# Altium footprint library Package_DFN_QFN.PcbLib: 735 footprints (part 41 of 46)
Each footprint in its own frame and in the unit in brackets; x right, y up, seen from the top. Pads: shape width x height; smd on the part's side, far side on the other; paste and mask are expansions set on the pad; w line width, h text height; cw(c..) or ccw(c..) is an arc to the next point about the centre after c.
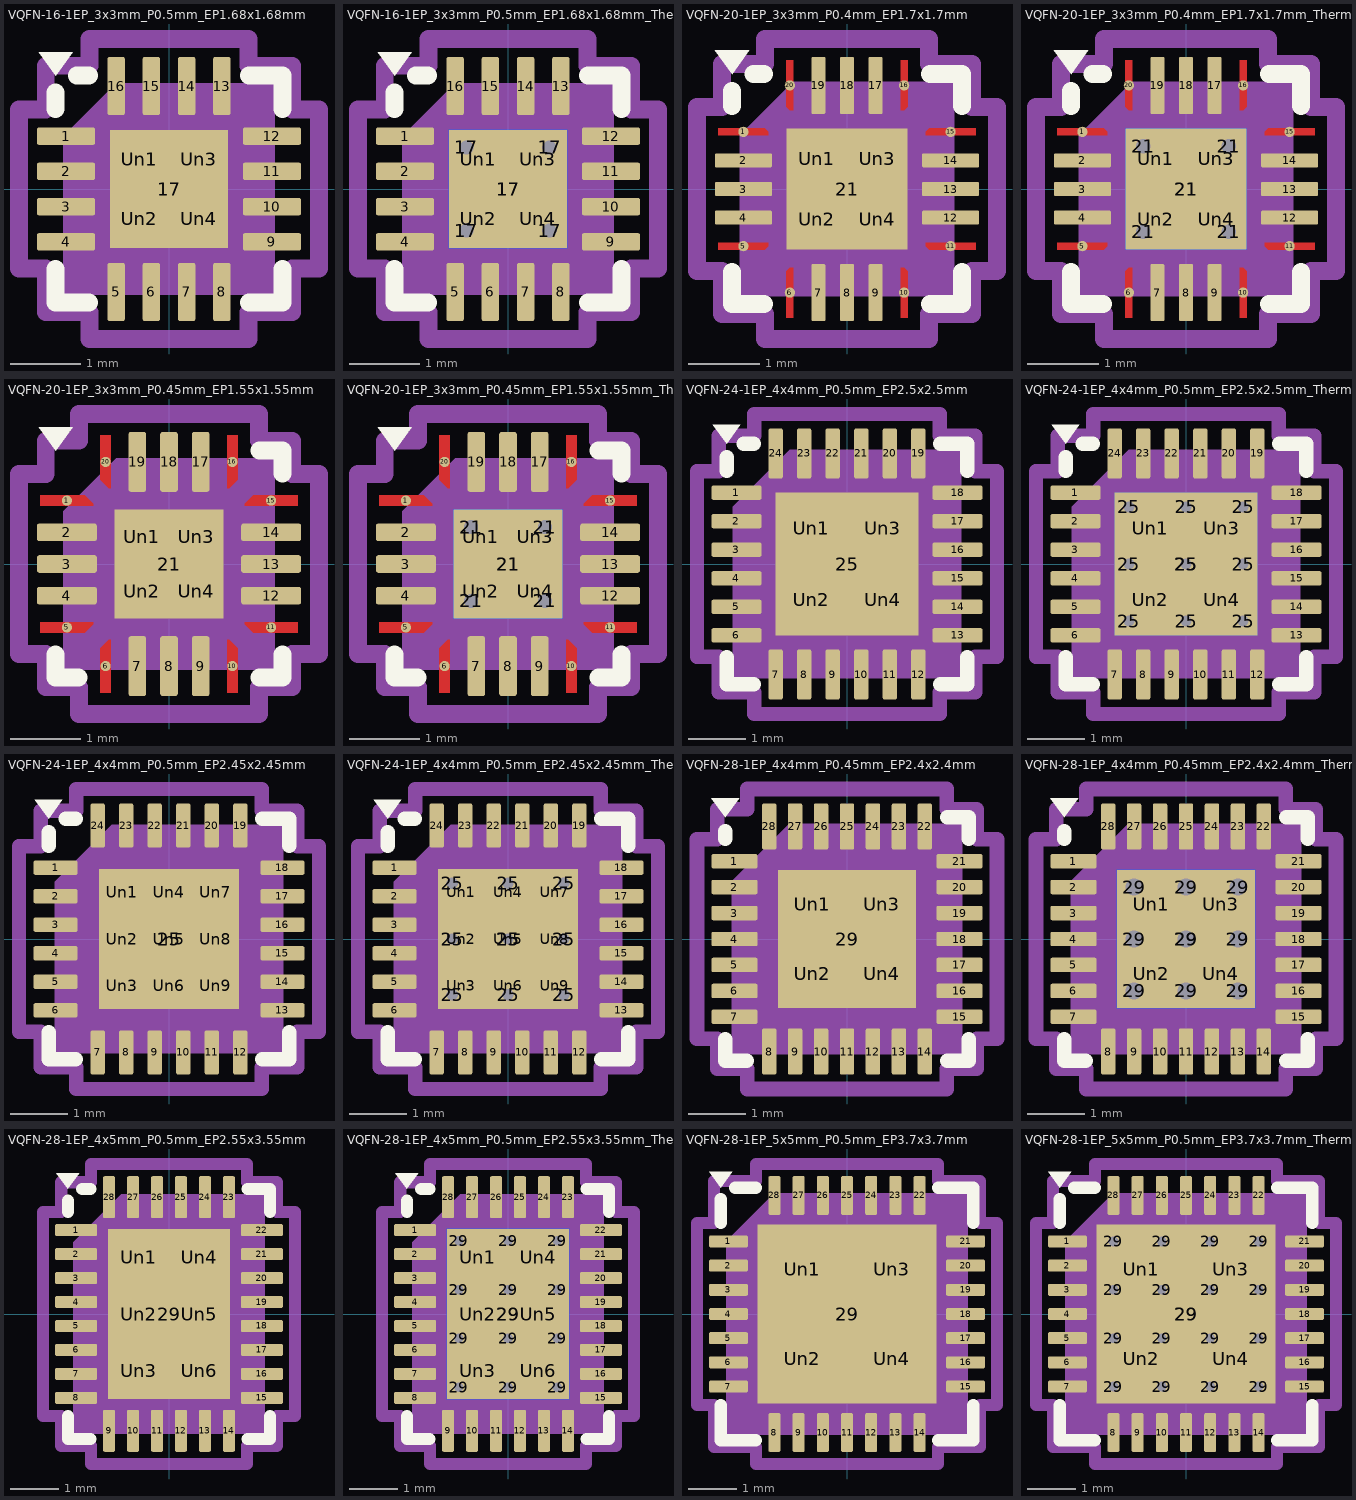
[diagram p40: the footprints below, top view; thin cyan lines are the x and y axes]

## VQFN-16-1EP_3x3mm_P0.5mm_EP1.68x1.68mm [mm] "VQFN-16-1EP_3x3mm_P0.5mm_EP1.68x1.68mm"
pads (21):
  rrect25% 0.825x0.25 smd: 1(-1.462,0.75) 2(-1.462,0.25) 3(-1.462,-0.25) 4(-1.462,-0.75) 9(1.462,-0.75) 10(1.462,-0.25) 11(1.462,0.25) 12(1.462,0.75)
  rrect25% 0.25x0.825 smd: 5(-0.75,-1.462) 6(-0.25,-1.462) 7(0.25,-1.462) 8(0.75,-1.462) 13(0.75,1.462) 14(0.25,1.462) 15(-0.25,1.462) 16(-0.75,1.462)
  rect 1.68x1.68 smd: 17(0,0)
  rrect25% 0.68x0.68 on Top Paste: Un1(-0.42,0.42) Un2(-0.42,-0.42) Un3(0.42,0.42) Un4(0.42,-0.42)
F.SilkS:
  region: -1.61,1.61 -1.85,1.94 -1.37,1.94
  lines w0.254: -1.61,-1.135 -1.61,-1.61 -1.135,-1.61 ; -1.61,1.135 -1.61,1.37 ; -1.31,1.61 -1.135,1.61 ; 1.135,-1.61 1.61,-1.61 1.61,-1.135 ; 1.135,1.61 1.61,1.61 1.61,1.135
Top Component Center:
  lines w0.127: -0.127,0 0.127,0 -0.127,0 ; 0,-0.127 0,0.127 0,-0.127
Top Assembly:
  region: 1.5,-1.5 -1.5,-1.5 -1.5,0.75 -0.75,1.5 1.5,1.5
Top Courtyard:
  lines w0.254: -2.13,-1.13 -1.75,-1.13 -1.75,-1.75 -1.13,-1.75 -1.13,-2.13 1.13,-2.13 1.13,-1.75 1.75,-1.75 1.75,-1.13 2.13,-1.13 2.13,1.13 1.75,1.13 1.75,1.75 1.13,1.75 1.13,2.13 -1.13,2.13 -1.13,1.75 -1.75,1.75 -1.75,1.13 -2.13,1.13 -2.13,-1.13
Top Designator:
  text ".Designator" at -3.43,-0.344 h1.52

## VQFN-16-1EP_3x3mm_P0.5mm_EP1.68x1.68mm_ThermalVias [mm] "VQFN-16-1EP_3x3mm_P0.5mm_EP1.68x1.68mm_ThermalVias"
pads (26):
  rrect25% 0.825x0.25 smd: 1(-1.462,0.75) 2(-1.462,0.25) 3(-1.462,-0.25) 4(-1.462,-0.75) 9(1.462,-0.75) 10(1.462,-0.25) 11(1.462,0.25) 12(1.462,0.75)
  rrect25% 0.25x0.825 smd: 5(-0.75,-1.462) 6(-0.25,-1.462) 7(0.25,-1.462) 8(0.75,-1.462) 13(0.75,1.462) 14(0.25,1.462) 15(-0.25,1.462) 16(-0.75,1.462)
  round 0.5 hole 0.2: 17(-0.59,-0.59) 17(-0.59,0.59) 17(0.59,-0.59) 17(0.59,0.59)
  rect 1.68x1.68 smd: 17(0,0)
  rect 1.68x1.68 smd far side: 17(0,0)
  rrect25% 0.73x0.73 on Top Paste: Un1(-0.42,0.42) Un2(-0.42,-0.42) Un3(0.42,0.42) Un4(0.42,-0.42)
F.SilkS:
  region: -1.61,1.61 -1.85,1.94 -1.37,1.94
  lines w0.254: -1.61,-1.135 -1.61,-1.61 -1.135,-1.61 ; -1.61,1.135 -1.61,1.37 ; -1.31,1.61 -1.135,1.61 ; 1.135,-1.61 1.61,-1.61 1.61,-1.135 ; 1.135,1.61 1.61,1.61 1.61,1.135
Top Component Center:
  lines w0.127: -0.127,0 0.127,0 -0.127,0 ; 0,-0.127 0,0.127 0,-0.127
Top Assembly:
  region: 1.5,-1.5 -1.5,-1.5 -1.5,0.75 -0.75,1.5 1.5,1.5
Top Courtyard:
  lines w0.254: -2.13,-1.13 -1.75,-1.13 -1.75,-1.75 -1.13,-1.75 -1.13,-2.13 1.13,-2.13 1.13,-1.75 1.75,-1.75 1.75,-1.13 2.13,-1.13 2.13,1.13 1.75,1.13 1.75,1.75 1.13,1.75 1.13,2.13 -1.13,2.13 -1.13,1.75 -1.75,1.75 -1.75,1.13 -2.13,1.13 -2.13,-1.13
Top Designator:
  text ".Designator" at -3.43,-0.344 h1.52

## VQFN-20-1EP_3x3mm_P0.4mm_EP1.7x1.7mm [mm] "VQFN-20-1EP_3x3mm_P0.4mm_EP1.7x1.7mm"
pads (25):
  round 0.143 smd: 1(-1.45,0.8) 5(-1.45,-0.8) 6(-0.8,-1.45) 10(0.8,-1.45) 11(1.45,-0.8) 15(1.45,0.8) 16(0.8,1.45) 20(-0.8,1.45)
  rrect25% 0.8x0.2 smd: 2(-1.45,0.4) 3(-1.45,0) 4(-1.45,-0.4) 12(1.45,-0.4) 13(1.45,0) 14(1.45,0.4)
  rrect25% 0.2x0.8 smd: 7(-0.4,-1.45) 8(0,-1.45) 9(0.4,-1.45) 17(0.4,1.45) 18(0,1.45) 19(-0.4,1.45)
  rect 1.7x1.7 smd: 21(0,0)
  rrect25% 0.69x0.69 on Top Paste: Un1(-0.425,0.425) Un2(-0.425,-0.425) Un3(0.425,0.425) Un4(0.425,-0.425)
F.Cu:
  region: -1.1,0.799 -1.1,0.75 -1.8,0.75 -1.8,0.85 -1.151,0.85
  region: -1.1,-0.799 -1.151,-0.85 -1.8,-0.85 -1.8,-0.75 -1.1,-0.75
  region: -0.75,-1.8 -0.85,-1.8 -0.85,-1.151 -0.799,-1.1 -0.75,-1.1
  region: 0.85,-1.151 0.85,-1.8 0.75,-1.8 0.75,-1.1 0.799,-1.1
  region: 1.8,-0.85 1.151,-0.85 1.1,-0.799 1.1,-0.75 1.8,-0.75
  region: 1.8,0.75 1.1,0.75 1.1,0.799 1.151,0.85 1.8,0.85
  region: 0.85,1.151 0.799,1.1 0.75,1.1 0.75,1.8 0.85,1.8
  region: -0.75,1.1 -0.799,1.1 -0.85,1.151 -0.85,1.8 -0.75,1.8
F.SilkS:
  region: -1.61,1.61 -1.85,1.94 -1.37,1.94
  lines w0.254: -1.61,-1.16 -1.61,-1.61 -1.16,-1.61 ; -1.61,1.16 -1.61,1.37 ; -1.31,1.61 -1.16,1.61 ; 1.16,-1.61 1.61,-1.61 1.61,-1.16 ; 1.16,1.61 1.61,1.61 1.61,1.16
F.Paste:
  region: -1.1,0.799 -1.1,0.75 -1.8,0.75 -1.8,0.85 -1.151,0.85
  region: -1.1,-0.799 -1.151,-0.85 -1.8,-0.85 -1.8,-0.75 -1.1,-0.75
  region: -0.75,-1.8 -0.85,-1.8 -0.85,-1.151 -0.799,-1.1 -0.75,-1.1
  region: 0.85,-1.151 0.85,-1.8 0.75,-1.8 0.75,-1.1 0.799,-1.1
  region: 1.8,-0.85 1.151,-0.85 1.1,-0.799 1.1,-0.75 1.8,-0.75
  region: 1.8,0.75 1.1,0.75 1.1,0.799 1.151,0.85 1.8,0.85
  region: 0.85,1.151 0.799,1.1 0.75,1.1 0.75,1.8 0.85,1.8
  region: -0.75,1.1 -0.799,1.1 -0.85,1.151 -0.85,1.8 -0.75,1.8
F.Mask:
  region: -1.1,0.799 -1.1,0.75 -1.8,0.75 -1.8,0.85 -1.151,0.85
  region: -1.1,-0.799 -1.151,-0.85 -1.8,-0.85 -1.8,-0.75 -1.1,-0.75
  region: -0.75,-1.8 -0.85,-1.8 -0.85,-1.151 -0.799,-1.1 -0.75,-1.1
  region: 0.85,-1.151 0.85,-1.8 0.75,-1.8 0.75,-1.1 0.799,-1.1
  region: 1.8,-0.85 1.151,-0.85 1.1,-0.799 1.1,-0.75 1.8,-0.75
  region: 1.8,0.75 1.1,0.75 1.1,0.799 1.151,0.85 1.8,0.85
  region: 0.85,1.151 0.799,1.1 0.75,1.1 0.75,1.8 0.85,1.8
  region: -0.75,1.1 -0.799,1.1 -0.85,1.151 -0.85,1.8 -0.75,1.8
Top Component Center:
  lines w0.127: -0.127,0 0.127,0 -0.127,0 ; 0,-0.127 0,0.127 0,-0.127
Top Assembly:
  region: 1.5,-1.5 -1.5,-1.5 -1.5,0.75 -0.75,1.5 1.5,1.5
Top Courtyard:
  lines w0.254: -2.1,-1.15 -2.1,1.15 -1.75,1.15 -1.75,1.75 -1.15,1.75 -1.15,2.1 1.15,2.1 1.15,1.75 1.75,1.75 1.75,1.15 2.1,1.15 2.1,-1.15 1.75,-1.15 1.75,-1.75 1.15,-1.75 1.15,-2.1 -1.15,-2.1 -1.15,-1.75 -1.75,-1.75 -1.75,-1.15 -2.1,-1.15
Top Designator:
  text ".Designator" at -3.43,-0.344 h1.52

## VQFN-20-1EP_3x3mm_P0.4mm_EP1.7x1.7mm_ThermalVias [mm] "VQFN-20-1EP_3x3mm_P0.4mm_EP1.7x1.7mm_ThermalVias"
pads (30):
  round 0.143 smd: 1(-1.45,0.8) 5(-1.45,-0.8) 6(-0.8,-1.45) 10(0.8,-1.45) 11(1.45,-0.8) 15(1.45,0.8) 16(0.8,1.45) 20(-0.8,1.45)
  rrect25% 0.8x0.2 smd: 2(-1.45,0.4) 3(-1.45,0) 4(-1.45,-0.4) 12(1.45,-0.4) 13(1.45,0) 14(1.45,0.4)
  rrect25% 0.2x0.8 smd: 7(-0.4,-1.45) 8(0,-1.45) 9(0.4,-1.45) 17(0.4,1.45) 18(0,1.45) 19(-0.4,1.45)
  round 0.5 hole 0.2: 21(-0.6,-0.6) 21(-0.6,0.6) 21(0.6,-0.6) 21(0.6,0.6)
  rect 1.7x1.7 smd: 21(0,0)
  rect 1.7x1.7 smd far side: 21(0,0)
  rrect25% 0.74x0.74 on Top Paste: Un1(-0.425,0.425) Un2(-0.425,-0.425) Un3(0.425,0.425) Un4(0.425,-0.425)
F.Cu:
  region: -1.1,0.799 -1.1,0.75 -1.8,0.75 -1.8,0.85 -1.151,0.85
  region: -1.1,-0.799 -1.151,-0.85 -1.8,-0.85 -1.8,-0.75 -1.1,-0.75
  region: -0.75,-1.8 -0.85,-1.8 -0.85,-1.151 -0.799,-1.1 -0.75,-1.1
  region: 0.85,-1.151 0.85,-1.8 0.75,-1.8 0.75,-1.1 0.799,-1.1
  region: 1.8,-0.85 1.151,-0.85 1.1,-0.799 1.1,-0.75 1.8,-0.75
  region: 1.8,0.75 1.1,0.75 1.1,0.799 1.151,0.85 1.8,0.85
  region: 0.85,1.151 0.799,1.1 0.75,1.1 0.75,1.8 0.85,1.8
  region: -0.75,1.1 -0.799,1.1 -0.85,1.151 -0.85,1.8 -0.75,1.8
F.SilkS:
  region: -1.61,1.61 -1.85,1.94 -1.37,1.94
  lines w0.254: -1.61,-1.16 -1.61,-1.61 -1.16,-1.61 ; -1.61,1.16 -1.61,1.37 ; -1.31,1.61 -1.16,1.61 ; 1.16,-1.61 1.61,-1.61 1.61,-1.16 ; 1.16,1.61 1.61,1.61 1.61,1.16
F.Paste:
  region: -1.1,0.799 -1.1,0.75 -1.8,0.75 -1.8,0.85 -1.151,0.85
  region: -1.1,-0.799 -1.151,-0.85 -1.8,-0.85 -1.8,-0.75 -1.1,-0.75
  region: -0.75,-1.8 -0.85,-1.8 -0.85,-1.151 -0.799,-1.1 -0.75,-1.1
  region: 0.85,-1.151 0.85,-1.8 0.75,-1.8 0.75,-1.1 0.799,-1.1
  region: 1.8,-0.85 1.151,-0.85 1.1,-0.799 1.1,-0.75 1.8,-0.75
  region: 1.8,0.75 1.1,0.75 1.1,0.799 1.151,0.85 1.8,0.85
  region: 0.85,1.151 0.799,1.1 0.75,1.1 0.75,1.8 0.85,1.8
  region: -0.75,1.1 -0.799,1.1 -0.85,1.151 -0.85,1.8 -0.75,1.8
F.Mask:
  region: -1.1,0.799 -1.1,0.75 -1.8,0.75 -1.8,0.85 -1.151,0.85
  region: -1.1,-0.799 -1.151,-0.85 -1.8,-0.85 -1.8,-0.75 -1.1,-0.75
  region: -0.75,-1.8 -0.85,-1.8 -0.85,-1.151 -0.799,-1.1 -0.75,-1.1
  region: 0.85,-1.151 0.85,-1.8 0.75,-1.8 0.75,-1.1 0.799,-1.1
  region: 1.8,-0.85 1.151,-0.85 1.1,-0.799 1.1,-0.75 1.8,-0.75
  region: 1.8,0.75 1.1,0.75 1.1,0.799 1.151,0.85 1.8,0.85
  region: 0.85,1.151 0.799,1.1 0.75,1.1 0.75,1.8 0.85,1.8
  region: -0.75,1.1 -0.799,1.1 -0.85,1.151 -0.85,1.8 -0.75,1.8
Top Component Center:
  lines w0.127: -0.127,0 0.127,0 -0.127,0 ; 0,-0.127 0,0.127 0,-0.127
Top Assembly:
  region: 1.5,-1.5 -1.5,-1.5 -1.5,0.75 -0.75,1.5 1.5,1.5
Top Courtyard:
  lines w0.254: -2.1,-1.15 -2.1,1.15 -1.75,1.15 -1.75,1.75 -1.15,1.75 -1.15,2.1 1.15,2.1 1.15,1.75 1.75,1.75 1.75,1.15 2.1,1.15 2.1,-1.15 1.75,-1.15 1.75,-1.75 1.15,-1.75 1.15,-2.1 -1.15,-2.1 -1.15,-1.75 -1.75,-1.75 -1.75,-1.15 -2.1,-1.15
Top Designator:
  text ".Designator" at -3.43,-0.344 h1.52

## VQFN-20-1EP_3x3mm_P0.45mm_EP1.55x1.55mm [mm] "VQFN-20-1EP_3x3mm_P0.45mm_EP1.55x1.55mm"
pads (25):
  round 0.144 smd: 1(-1.45,0.9) 5(-1.45,-0.9) 6(-0.9,-1.45) 10(0.9,-1.45) 11(1.45,-0.9) 15(1.45,0.9) 16(0.9,1.45) 20(-0.9,1.45)
  rrect25% 0.85x0.25 smd: 2(-1.45,0.45) 3(-1.45,0) 4(-1.45,-0.45) 12(1.45,-0.45) 13(1.45,0) 14(1.45,0.45)
  rrect25% 0.25x0.85 smd: 7(-0.45,-1.45) 8(0,-1.45) 9(0.45,-1.45) 17(0.45,1.45) 18(0,1.45) 19(-0.45,1.45)
  rect 1.55x1.55 smd: 21(0,0)
  rrect25% 0.62x0.62 on Top Paste: Un1(-0.39,0.39) Un2(-0.39,-0.39) Un3(0.39,0.39) Un4(0.39,-0.39)
F.Cu:
  region: -1.075,0.854 -1.075,0.825 -1.825,0.825 -1.825,0.975 -1.196,0.975
  region: -1.075,-0.854 -1.196,-0.975 -1.825,-0.975 -1.825,-0.825 -1.075,-0.825
  region: -0.825,-1.825 -0.975,-1.825 -0.975,-1.196 -0.854,-1.075 -0.825,-1.075
  region: 0.975,-1.196 0.975,-1.825 0.825,-1.825 0.825,-1.075 0.854,-1.075
  region: 1.825,-0.975 1.196,-0.975 1.075,-0.854 1.075,-0.825 1.825,-0.825
  region: 1.825,0.825 1.075,0.825 1.075,0.854 1.196,0.975 1.825,0.975
  region: 0.975,1.196 0.854,1.075 0.825,1.075 0.825,1.825 0.975,1.825
  region: -0.825,1.075 -0.854,1.075 -0.975,1.196 -0.975,1.825 -0.825,1.825
F.SilkS:
  region: -1.61,1.61 -1.85,1.94 -1.37,1.94
  lines w0.254: -1.61,-1.285 -1.61,-1.61 -1.285,-1.61 ; 1.285,-1.61 1.61,-1.61 1.61,-1.285 ; 1.285,1.61 1.61,1.61 1.61,1.285
F.Paste:
  region: -1.075,0.854 -1.075,0.825 -1.825,0.825 -1.825,0.975 -1.196,0.975
  region: -1.075,-0.854 -1.196,-0.975 -1.825,-0.975 -1.825,-0.825 -1.075,-0.825
  region: -0.825,-1.825 -0.975,-1.825 -0.975,-1.196 -0.854,-1.075 -0.825,-1.075
  region: 0.975,-1.196 0.975,-1.825 0.825,-1.825 0.825,-1.075 0.854,-1.075
  region: 1.825,-0.975 1.196,-0.975 1.075,-0.854 1.075,-0.825 1.825,-0.825
  region: 1.825,0.825 1.075,0.825 1.075,0.854 1.196,0.975 1.825,0.975
  region: 0.975,1.196 0.854,1.075 0.825,1.075 0.825,1.825 0.975,1.825
  region: -0.825,1.075 -0.854,1.075 -0.975,1.196 -0.975,1.825 -0.825,1.825
F.Mask:
  region: -1.075,0.854 -1.075,0.825 -1.825,0.825 -1.825,0.975 -1.196,0.975
  region: -1.075,-0.854 -1.196,-0.975 -1.825,-0.975 -1.825,-0.825 -1.075,-0.825
  region: -0.825,-1.825 -0.975,-1.825 -0.975,-1.196 -0.854,-1.075 -0.825,-1.075
  region: 0.975,-1.196 0.975,-1.825 0.825,-1.825 0.825,-1.075 0.854,-1.075
  region: 1.825,-0.975 1.196,-0.975 1.075,-0.854 1.075,-0.825 1.825,-0.825
  region: 1.825,0.825 1.075,0.825 1.075,0.854 1.196,0.975 1.825,0.975
  region: 0.975,1.196 0.854,1.075 0.825,1.075 0.825,1.825 0.975,1.825
  region: -0.825,1.075 -0.854,1.075 -0.975,1.196 -0.975,1.825 -0.825,1.825
Top Component Center:
  lines w0.127: -0.127,0 0.127,0 -0.127,0 ; 0,-0.127 0,0.127 0,-0.127
Top Assembly:
  region: 1.5,-1.5 -1.5,-1.5 -1.5,0.75 -0.75,1.5 1.5,1.5
Top Courtyard:
  lines w0.254: -2.13,-1.28 -2.13,1.28 -1.75,1.28 -1.75,1.75 -1.28,1.75 -1.28,2.13 1.28,2.13 1.28,1.75 1.75,1.75 1.75,1.28 2.13,1.28 2.13,-1.28 1.75,-1.28 1.75,-1.75 1.28,-1.75 1.28,-2.13 -1.28,-2.13 -1.28,-1.75 -1.75,-1.75 -1.75,-1.28 -2.13,-1.28
Top Designator:
  text ".Designator" at -3.43,-0.344 h1.52

## VQFN-20-1EP_3x3mm_P0.45mm_EP1.55x1.55mm_ThermalVias [mm] "VQFN-20-1EP_3x3mm_P0.45mm_EP1.55x1.55mm_ThermalVias"
pads (30):
  round 0.144 smd: 1(-1.45,0.9) 5(-1.45,-0.9) 6(-0.9,-1.45) 10(0.9,-1.45) 11(1.45,-0.9) 15(1.45,0.9) 16(0.9,1.45) 20(-0.9,1.45)
  rrect25% 0.85x0.25 smd: 2(-1.45,0.45) 3(-1.45,0) 4(-1.45,-0.45) 12(1.45,-0.45) 13(1.45,0) 14(1.45,0.45)
  rrect25% 0.25x0.85 smd: 7(-0.45,-1.45) 8(0,-1.45) 9(0.45,-1.45) 17(0.45,1.45) 18(0,1.45) 19(-0.45,1.45)
  round 0.5 hole 0.2: 21(-0.525,-0.525) 21(-0.525,0.525) 21(0.525,-0.525) 21(0.525,0.525)
  rect 1.55x1.55 smd: 21(0,0)
  rect 1.55x1.55 smd far side: 21(0,0)
  rrect25% 0.67x0.67 on Top Paste: Un1(-0.39,0.39) Un2(-0.39,-0.39) Un3(0.39,0.39) Un4(0.39,-0.39)
F.Cu:
  region: -1.075,0.854 -1.075,0.825 -1.825,0.825 -1.825,0.975 -1.196,0.975
  region: -1.075,-0.854 -1.196,-0.975 -1.825,-0.975 -1.825,-0.825 -1.075,-0.825
  region: -0.825,-1.825 -0.975,-1.825 -0.975,-1.196 -0.854,-1.075 -0.825,-1.075
  region: 0.975,-1.196 0.975,-1.825 0.825,-1.825 0.825,-1.075 0.854,-1.075
  region: 1.825,-0.975 1.196,-0.975 1.075,-0.854 1.075,-0.825 1.825,-0.825
  region: 1.825,0.825 1.075,0.825 1.075,0.854 1.196,0.975 1.825,0.975
  region: 0.975,1.196 0.854,1.075 0.825,1.075 0.825,1.825 0.975,1.825
  region: -0.825,1.075 -0.854,1.075 -0.975,1.196 -0.975,1.825 -0.825,1.825
F.SilkS:
  region: -1.61,1.61 -1.85,1.94 -1.37,1.94
  lines w0.254: -1.61,-1.285 -1.61,-1.61 -1.285,-1.61 ; 1.285,-1.61 1.61,-1.61 1.61,-1.285 ; 1.285,1.61 1.61,1.61 1.61,1.285
F.Paste:
  region: -1.075,0.854 -1.075,0.825 -1.825,0.825 -1.825,0.975 -1.196,0.975
  region: -1.075,-0.854 -1.196,-0.975 -1.825,-0.975 -1.825,-0.825 -1.075,-0.825
  region: -0.825,-1.825 -0.975,-1.825 -0.975,-1.196 -0.854,-1.075 -0.825,-1.075
  region: 0.975,-1.196 0.975,-1.825 0.825,-1.825 0.825,-1.075 0.854,-1.075
  region: 1.825,-0.975 1.196,-0.975 1.075,-0.854 1.075,-0.825 1.825,-0.825
  region: 1.825,0.825 1.075,0.825 1.075,0.854 1.196,0.975 1.825,0.975
  region: 0.975,1.196 0.854,1.075 0.825,1.075 0.825,1.825 0.975,1.825
  region: -0.825,1.075 -0.854,1.075 -0.975,1.196 -0.975,1.825 -0.825,1.825
F.Mask:
  region: -1.075,0.854 -1.075,0.825 -1.825,0.825 -1.825,0.975 -1.196,0.975
  region: -1.075,-0.854 -1.196,-0.975 -1.825,-0.975 -1.825,-0.825 -1.075,-0.825
  region: -0.825,-1.825 -0.975,-1.825 -0.975,-1.196 -0.854,-1.075 -0.825,-1.075
  region: 0.975,-1.196 0.975,-1.825 0.825,-1.825 0.825,-1.075 0.854,-1.075
  region: 1.825,-0.975 1.196,-0.975 1.075,-0.854 1.075,-0.825 1.825,-0.825
  region: 1.825,0.825 1.075,0.825 1.075,0.854 1.196,0.975 1.825,0.975
  region: 0.975,1.196 0.854,1.075 0.825,1.075 0.825,1.825 0.975,1.825
  region: -0.825,1.075 -0.854,1.075 -0.975,1.196 -0.975,1.825 -0.825,1.825
Top Component Center:
  lines w0.127: -0.127,0 0.127,0 -0.127,0 ; 0,-0.127 0,0.127 0,-0.127
Top Assembly:
  region: 1.5,-1.5 -1.5,-1.5 -1.5,0.75 -0.75,1.5 1.5,1.5
Top Courtyard:
  lines w0.254: -2.13,-1.28 -2.13,1.28 -1.75,1.28 -1.75,1.75 -1.28,1.75 -1.28,2.13 1.28,2.13 1.28,1.75 1.75,1.75 1.75,1.28 2.13,1.28 2.13,-1.28 1.75,-1.28 1.75,-1.75 1.28,-1.75 1.28,-2.13 -1.28,-2.13 -1.28,-1.75 -1.75,-1.75 -1.75,-1.28 -2.13,-1.28
Top Designator:
  text ".Designator" at -3.43,-0.344 h1.52

## VQFN-24-1EP_4x4mm_P0.5mm_EP2.5x2.5mm [mm] "VQFN-24-1EP_4x4mm_P0.5mm_EP2.5x2.5mm"
pads (29):
  rrect25% 0.875x0.25 smd: 1(-1.937,1.25) 2(-1.937,0.75) 3(-1.937,0.25) 4(-1.937,-0.25) 5(-1.937,-0.75) 6(-1.937,-1.25) 13(1.937,-1.25) 14(1.937,-0.75) 15(1.937,-0.25) 16(1.937,0.25) 17(1.937,0.75) 18(1.937,1.25)
  rrect25% 0.25x0.875 smd: 7(-1.25,-1.937) 8(-0.75,-1.937) 9(-0.25,-1.937) 10(0.25,-1.937) 11(0.75,-1.937) 12(1.25,-1.937) 19(1.25,1.937) 20(0.75,1.937) 21(0.25,1.937) 22(-0.25,1.937) 23(-0.75,1.937) 24(-1.25,1.937)
  rect 2.5x2.5 smd: 25(0,0)
  rrect25% 1.01x1.01 on Top Paste: Un1(-0.625,0.625) Un2(-0.625,-0.625) Un3(0.625,0.625) Un4(0.625,-0.625)
F.SilkS:
  region: -2.11,2.11 -2.35,2.44 -1.87,2.44
  lines w0.254: -2.11,-1.635 -2.11,-2.11 -1.635,-2.11 ; -2.11,1.635 -2.11,1.87 ; -1.81,2.11 -1.635,2.11 ; 1.635,-2.11 2.11,-2.11 2.11,-1.635 ; 1.635,2.11 2.11,2.11 2.11,1.635
Top Component Center:
  lines w0.127: -0.127,0 0.127,0 -0.127,0 ; 0,-0.127 0,0.127 0,-0.127
Top Assembly:
  region: 2,-2 -2,-2 -2,1 -1,2 2,2
Top Courtyard:
  lines w0.254: -2.63,-1.63 -2.63,1.63 -2.25,1.63 -2.25,2.25 -1.63,2.25 -1.63,2.63 1.63,2.63 1.63,2.25 2.25,2.25 2.25,1.63 2.63,1.63 2.63,-1.63 2.25,-1.63 2.25,-2.25 1.63,-2.25 1.63,-2.63 -1.63,-2.63 -1.63,-2.25 -2.25,-2.25 -2.25,-1.63 -2.63,-1.63
Top Designator:
  text ".Designator" at -3.43,-0.344 h1.52

## VQFN-24-1EP_4x4mm_P0.5mm_EP2.5x2.5mm_ThermalVias [mm] "VQFN-24-1EP_4x4mm_P0.5mm_EP2.5x2.5mm_ThermalVias"
pads (39):
  rrect25% 0.875x0.25 smd: 1(-1.937,1.25) 2(-1.937,0.75) 3(-1.937,0.25) 4(-1.937,-0.25) 5(-1.937,-0.75) 6(-1.937,-1.25) 13(1.937,-1.25) 14(1.937,-0.75) 15(1.937,-0.25) 16(1.937,0.25) 17(1.937,0.75) 18(1.937,1.25)
  rrect25% 0.25x0.875 smd: 7(-1.25,-1.937) 8(-0.75,-1.937) 9(-0.25,-1.937) 10(0.25,-1.937) 11(0.75,-1.937) 12(1.25,-1.937) 19(1.25,1.937) 20(0.75,1.937) 21(0.25,1.937) 22(-0.25,1.937) 23(-0.75,1.937) 24(-1.25,1.937)
  round 0.5 hole 0.2: 25(-1,-1) 25(-1,0) 25(-1,1) 25(0,-1) 25(0,0) 25(0,1) 25(1,-1) 25(1,0) 25(1,1)
  rect 2.5x2.5 smd: 25(0,0)
  rect 2.5x2.5 smd far side: 25(0,0)
  rrect25% 0.93x0.93 on Top Paste: Un1(-0.625,0.625) Un2(-0.625,-0.625) Un3(0.625,0.625) Un4(0.625,-0.625)
F.SilkS:
  region: -2.11,2.11 -2.35,2.44 -1.87,2.44
  lines w0.254: -2.11,-1.635 -2.11,-2.11 -1.635,-2.11 ; -2.11,1.635 -2.11,1.87 ; -1.81,2.11 -1.635,2.11 ; 1.635,-2.11 2.11,-2.11 2.11,-1.635 ; 1.635,2.11 2.11,2.11 2.11,1.635
Top Component Center:
  lines w0.127: -0.127,0 0.127,0 -0.127,0 ; 0,-0.127 0,0.127 0,-0.127
Top Assembly:
  region: 2,-2 -2,-2 -2,1 -1,2 2,2
Top Courtyard:
  lines w0.254: -2.63,-1.63 -2.63,1.63 -2.25,1.63 -2.25,2.25 -1.63,2.25 -1.63,2.63 1.63,2.63 1.63,2.25 2.25,2.25 2.25,1.63 2.63,1.63 2.63,-1.63 2.25,-1.63 2.25,-2.25 1.63,-2.25 1.63,-2.63 -1.63,-2.63 -1.63,-2.25 -2.25,-2.25 -2.25,-1.63 -2.63,-1.63
Top Designator:
  text ".Designator" at -3.43,-0.344 h1.52

## VQFN-24-1EP_4x4mm_P0.5mm_EP2.45x2.45mm [mm] "VQFN-24-1EP_4x4mm_P0.5mm_EP2.45x2.45mm"
pads (34):
  rrect25% 0.775x0.25 smd: 1(-1.987,1.25) 2(-1.987,0.75) 3(-1.987,0.25) 4(-1.987,-0.25) 5(-1.987,-0.75) 6(-1.987,-1.25) 13(1.987,-1.25) 14(1.987,-0.75) 15(1.987,-0.25) 16(1.987,0.25) 17(1.987,0.75) 18(1.987,1.25)
  rrect25% 0.25x0.775 smd: 7(-1.25,-1.987) 8(-0.75,-1.987) 9(-0.25,-1.987) 10(0.25,-1.987) 11(0.75,-1.987) 12(1.25,-1.987) 19(1.25,1.987) 20(0.75,1.987) 21(0.25,1.987) 22(-0.25,1.987) 23(-0.75,1.987) 24(-1.25,1.987)
  rect 2.45x2.45 smd: 25(0,0)
  rrect25% 0.66x0.66 on Top Paste: Un1(-0.82,0.82) Un2(-0.82,0) Un3(-0.82,-0.82) Un4(0,0.82) Un5(0,0) Un6(0,-0.82) Un7(0.82,0.82) Un8(0.82,0) Un9(0.82,-0.82)
F.SilkS:
  region: -2.11,2.11 -2.35,2.44 -1.87,2.44
  lines w0.254: -2.11,-1.635 -2.11,-2.11 -1.635,-2.11 ; -2.11,1.635 -2.11,1.87 ; -1.81,2.11 -1.635,2.11 ; 1.635,-2.11 2.11,-2.11 2.11,-1.635 ; 1.635,2.11 2.11,2.11 2.11,1.635
Top Component Center:
  lines w0.127: -0.127,0 0.127,0 -0.127,0 ; 0,-0.127 0,0.127 0,-0.127
Top Assembly:
  region: 2,-2 -2,-2 -2,1 -1,2 2,2
Top Courtyard:
  lines w0.254: -2.63,-1.63 -2.63,1.63 -2.25,1.63 -2.25,2.25 -1.63,2.25 -1.63,2.63 1.63,2.63 1.63,2.25 2.25,2.25 2.25,1.63 2.63,1.63 2.63,-1.63 2.25,-1.63 2.25,-2.25 1.63,-2.25 1.63,-2.63 -1.63,-2.63 -1.63,-2.25 -2.25,-2.25 -2.25,-1.63 -2.63,-1.63
Top Designator:
  text ".Designator" at -3.43,-0.344 h1.52

## VQFN-24-1EP_4x4mm_P0.5mm_EP2.45x2.45mm_ThermalVias [mm] "VQFN-24-1EP_4x4mm_P0.5mm_EP2.45x2.45mm_ThermalVias"
pads (44):
  rrect25% 0.775x0.25 smd: 1(-1.987,1.25) 2(-1.987,0.75) 3(-1.987,0.25) 4(-1.987,-0.25) 5(-1.987,-0.75) 6(-1.987,-1.25) 13(1.987,-1.25) 14(1.987,-0.75) 15(1.987,-0.25) 16(1.987,0.25) 17(1.987,0.75) 18(1.987,1.25)
  rrect25% 0.25x0.775 smd: 7(-1.25,-1.987) 8(-0.75,-1.987) 9(-0.25,-1.987) 10(0.25,-1.987) 11(0.75,-1.987) 12(1.25,-1.987) 19(1.25,1.987) 20(0.75,1.987) 21(0.25,1.987) 22(-0.25,1.987) 23(-0.75,1.987) 24(-1.25,1.987)
  round 0.5 hole 0.2: 25(-0.975,-0.975) 25(-0.975,0) 25(-0.975,0.975) 25(0,-0.975) 25(0,0) 25(0,0.975) 25(0.975,-0.975) 25(0.975,0) 25(0.975,0.975)
  rect 2.45x2.45 smd: 25(0,0)
  rect 2.45x2.45 smd far side: 25(0,0)
  rrect25% 0.61x0.61 on Top Paste: Un1(-0.82,0.82) Un2(-0.82,0) Un3(-0.82,-0.82) Un4(0,0.82) Un5(0,0) Un6(0,-0.82) Un7(0.82,0.82) Un8(0.82,0) Un9(0.82,-0.82)
F.SilkS:
  region: -2.11,2.11 -2.35,2.44 -1.87,2.44
  lines w0.254: -2.11,-1.635 -2.11,-2.11 -1.635,-2.11 ; -2.11,1.635 -2.11,1.87 ; -1.81,2.11 -1.635,2.11 ; 1.635,-2.11 2.11,-2.11 2.11,-1.635 ; 1.635,2.11 2.11,2.11 2.11,1.635
Top Component Center:
  lines w0.127: -0.127,0 0.127,0 -0.127,0 ; 0,-0.127 0,0.127 0,-0.127
Top Assembly:
  region: 2,-2 -2,-2 -2,1 -1,2 2,2
Top Courtyard:
  lines w0.254: -2.63,-1.63 -2.63,1.63 -2.25,1.63 -2.25,2.25 -1.63,2.25 -1.63,2.63 1.63,2.63 1.63,2.25 2.25,2.25 2.25,1.63 2.63,1.63 2.63,-1.63 2.25,-1.63 2.25,-2.25 1.63,-2.25 1.63,-2.63 -1.63,-2.63 -1.63,-2.25 -2.25,-2.25 -2.25,-1.63 -2.63,-1.63
Top Designator:
  text ".Designator" at -3.43,-0.344 h1.52

## VQFN-28-1EP_4x4mm_P0.45mm_EP2.4x2.4mm [mm] "VQFN-28-1EP_4x4mm_P0.45mm_EP2.4x2.4mm"
pads (33):
  rrect25% 0.8x0.25 smd: 1(-1.95,1.35) 2(-1.95,0.9) 3(-1.95,0.45) 4(-1.95,0) 5(-1.95,-0.45) 6(-1.95,-0.9) 7(-1.95,-1.35) 15(1.95,-1.35) 16(1.95,-0.9) 17(1.95,-0.45) 18(1.95,0) 19(1.95,0.45) 20(1.95,0.9) 21(1.95,1.35)
  rrect25% 0.25x0.8 smd: 8(-1.35,-1.95) 9(-0.9,-1.95) 10(-0.45,-1.95) 11(0,-1.95) 12(0.45,-1.95) 13(0.9,-1.95) 14(1.35,-1.95) 22(1.35,1.95) 23(0.9,1.95) 24(0.45,1.95) 25(0,1.95) 26(-0.45,1.95) 27(-0.9,1.95) 28(-1.35,1.95)
  rect 2.4x2.4 smd: 29(0,0)
  rrect25% 0.97x0.97 on Top Paste: Un1(-0.6,0.6) Un2(-0.6,-0.6) Un3(0.6,0.6) Un4(0.6,-0.6)
F.SilkS:
  region: -2.11,2.11 -2.35,2.44 -1.87,2.44
  lines w0.254: -2.11,-1.735 -2.11,-2.11 -1.735,-2.11 ; -2.11,1.735 -2.11,1.87 ; 1.735,-2.11 2.11,-2.11 2.11,-1.735 ; 1.735,2.11 2.11,2.11 2.11,1.735
Top Component Center:
  lines w0.127: -0.127,0 0.127,0 -0.127,0 ; 0,-0.127 0,0.127 0,-0.127
Top Assembly:
  region: 2,-2 -2,-2 -2,1 -1,2 2,2
Top Courtyard:
  lines w0.254: -2.6,-1.73 -2.6,1.73 -2.25,1.73 -2.25,2.25 -1.73,2.25 -1.73,2.6 1.73,2.6 1.73,2.25 2.25,2.25 2.25,1.73 2.6,1.73 2.6,-1.73 2.25,-1.73 2.25,-2.25 1.73,-2.25 1.73,-2.6 -1.73,-2.6 -1.73,-2.25 -2.25,-2.25 -2.25,-1.73 -2.6,-1.73
Top Designator:
  text ".Designator" at -3.43,-0.344 h1.52

## VQFN-28-1EP_4x4mm_P0.45mm_EP2.4x2.4mm_ThermalVias [mm] "VQFN-28-1EP_4x4mm_P0.45mm_EP2.4x2.4mm_ThermalVias"
pads (43):
  rrect25% 0.8x0.25 smd: 1(-1.95,1.35) 2(-1.95,0.9) 3(-1.95,0.45) 4(-1.95,0) 5(-1.95,-0.45) 6(-1.95,-0.9) 7(-1.95,-1.35) 15(1.95,-1.35) 16(1.95,-0.9) 17(1.95,-0.45) 18(1.95,0) 19(1.95,0.45) 20(1.95,0.9) 21(1.95,1.35)
  rrect25% 0.25x0.8 smd: 8(-1.35,-1.95) 9(-0.9,-1.95) 10(-0.45,-1.95) 11(0,-1.95) 12(0.45,-1.95) 13(0.9,-1.95) 14(1.35,-1.95) 22(1.35,1.95) 23(0.9,1.95) 24(0.45,1.95) 25(0,1.95) 26(-0.45,1.95) 27(-0.9,1.95) 28(-1.35,1.95)
  round 0.6 hole 0.3: 29(-0.9,-0.9) 29(-0.9,0) 29(-0.9,0.9) 29(0,-0.9) 29(0,0) 29(0,0.9) 29(0.9,-0.9) 29(0.9,0) 29(0.9,0.9)
  rect 2.4x2.4 smd: 29(0,0)
  rect 2.4x2.4 smd far side: 29(0,0)
  rrect25% 1x1 on Top Paste: Un1(-0.6,0.6) Un2(-0.6,-0.6) Un3(0.6,0.6) Un4(0.6,-0.6)
F.SilkS:
  region: -2.11,2.11 -2.35,2.44 -1.87,2.44
  lines w0.254: -2.11,-1.735 -2.11,-2.11 -1.735,-2.11 ; -2.11,1.735 -2.11,1.87 ; 1.735,-2.11 2.11,-2.11 2.11,-1.735 ; 1.735,2.11 2.11,2.11 2.11,1.735
Top Component Center:
  lines w0.127: -0.127,0 0.127,0 -0.127,0 ; 0,-0.127 0,0.127 0,-0.127
Top Assembly:
  region: 2,-2 -2,-2 -2,1 -1,2 2,2
Top Courtyard:
  lines w0.254: -2.6,-1.73 -2.6,1.73 -2.25,1.73 -2.25,2.25 -1.73,2.25 -1.73,2.6 1.73,2.6 1.73,2.25 2.25,2.25 2.25,1.73 2.6,1.73 2.6,-1.73 2.25,-1.73 2.25,-2.25 1.73,-2.25 1.73,-2.6 -1.73,-2.6 -1.73,-2.25 -2.25,-2.25 -2.25,-1.73 -2.6,-1.73
Top Designator:
  text ".Designator" at -3.43,-0.344 h1.52

## VQFN-28-1EP_4x5mm_P0.5mm_EP2.55x3.55mm [mm] "VQFN-28-1EP_4x5mm_P0.5mm_EP2.55x3.55mm"
pads (35):
  rrect25% 0.875x0.25 smd: 1(-1.937,1.75) 2(-1.937,1.25) 3(-1.937,0.75) 4(-1.937,0.25) 5(-1.937,-0.25) 6(-1.937,-0.75) 7(-1.937,-1.25) 8(-1.937,-1.75) 15(1.937,-1.75) 16(1.937,-1.25) 17(1.937,-0.75) 18(1.937,-0.25) 19(1.937,0.25) 20(1.937,0.75) 21(1.937,1.25) 22(1.937,1.75)
  rrect25% 0.25x0.875 smd: 9(-1.25,-2.438) 10(-0.75,-2.438) 11(-0.25,-2.438) 12(0.25,-2.438) 13(0.75,-2.438) 14(1.25,-2.438) 23(1.25,2.438) 24(0.75,2.438) 25(0.25,2.438) 26(-0.25,2.438) 27(-0.75,2.438) 28(-1.25,2.438)
  rect 2.55x3.55 smd: 29(0,0)
  rrect25% 1.03x0.95 on Top Paste: Un1(-0.635,1.18) Un2(-0.635,0) Un3(-0.635,-1.18) Un4(0.635,1.18) Un5(0.635,0) Un6(0.635,-1.18)
F.SilkS:
  region: -2.11,2.61 -2.35,2.94 -1.87,2.94
  lines w0.254: -2.11,-2.135 -2.11,-2.61 -1.635,-2.61 ; -2.11,2.135 -2.11,2.37 ; -1.81,2.61 -1.635,2.61 ; 1.635,-2.61 2.11,-2.61 2.11,-2.135 ; 1.635,2.61 2.11,2.61 2.11,2.135
Top Component Center:
  lines w0.127: -0.127,0 0.127,0 -0.127,0 ; 0,-0.127 0,0.127 0,-0.127
Top Assembly:
  region: 2,-2.5 -2,-2.5 -2,1.5 -1,2.5 2,2.5
Top Courtyard:
  lines w0.254: -2.63,-2.13 -2.63,2.13 -2.25,2.13 -2.25,2.75 -1.63,2.75 -1.63,3.13 1.63,3.13 1.63,2.75 2.25,2.75 2.25,2.13 2.63,2.13 2.63,-2.13 2.25,-2.13 2.25,-2.75 1.63,-2.75 1.63,-3.13 -1.63,-3.13 -1.63,-2.75 -2.25,-2.75 -2.25,-2.13 -2.63,-2.13
Top Designator:
  text ".Designator" at -3.43,-0.344 h1.52

## VQFN-28-1EP_4x5mm_P0.5mm_EP2.55x3.55mm_ThermalVias [mm] "VQFN-28-1EP_4x5mm_P0.5mm_EP2.55x3.55mm_ThermalVias"
pads (48):
  rrect25% 0.875x0.25 smd: 1(-1.937,1.75) 2(-1.937,1.25) 3(-1.937,0.75) 4(-1.937,0.25) 5(-1.937,-0.25) 6(-1.937,-0.75) 7(-1.937,-1.25) 8(-1.937,-1.75) 15(1.937,-1.75) 16(1.937,-1.25) 17(1.937,-0.75) 18(1.937,-0.25) 19(1.937,0.25) 20(1.937,0.75) 21(1.937,1.25) 22(1.937,1.75)
  rrect25% 0.25x0.875 smd: 9(-1.25,-2.438) 10(-0.75,-2.438) 11(-0.25,-2.438) 12(0.25,-2.438) 13(0.75,-2.438) 14(1.25,-2.438) 23(1.25,2.438) 24(0.75,2.438) 25(0.25,2.438) 26(-0.25,2.438) 27(-0.75,2.438) 28(-1.25,2.438)
  round 0.5 hole 0.2: 29(-1.025,-1.525) 29(-1.025,-0.508) 29(-1.025,0.508) 29(-1.025,1.525) 29(0,-1.525) 29(0,-0.508) 29(0,0.508) 29(0,1.525) 29(1.025,-1.525) 29(1.025,-0.508) 29(1.025,0.508) 29(1.025,1.525)
  rect 2.55x3.55 smd: 29(0,0)
  rect 2.55x3.55 smd far side: 29(0,0)
  rrect25% 1.03x0.95 on Top Paste: Un1(-0.635,1.18) Un2(-0.635,0) Un3(-0.635,-1.18) Un4(0.635,1.18) Un5(0.635,0) Un6(0.635,-1.18)
F.SilkS:
  region: -2.11,2.61 -2.35,2.94 -1.87,2.94
  lines w0.254: -2.11,-2.135 -2.11,-2.61 -1.635,-2.61 ; -2.11,2.135 -2.11,2.37 ; -1.81,2.61 -1.635,2.61 ; 1.635,-2.61 2.11,-2.61 2.11,-2.135 ; 1.635,2.61 2.11,2.61 2.11,2.135
Top Component Center:
  lines w0.127: -0.127,0 0.127,0 -0.127,0 ; 0,-0.127 0,0.127 0,-0.127
Top Assembly:
  region: 2,-2.5 -2,-2.5 -2,1.5 -1,2.5 2,2.5
Top Courtyard:
  lines w0.254: -2.63,-2.13 -2.63,2.13 -2.25,2.13 -2.25,2.75 -1.63,2.75 -1.63,3.13 1.63,3.13 1.63,2.75 2.25,2.75 2.25,2.13 2.63,2.13 2.63,-2.13 2.25,-2.13 2.25,-2.75 1.63,-2.75 1.63,-3.13 -1.63,-3.13 -1.63,-2.75 -2.25,-2.75 -2.25,-2.13 -2.63,-2.13
Top Designator:
  text ".Designator" at -3.43,-0.344 h1.52

## VQFN-28-1EP_5x5mm_P0.5mm_EP3.7x3.7mm [mm] "VQFN-28-1EP_5x5mm_P0.5mm_EP3.7x3.7mm"
pads (33):
  rrect25% 0.8x0.25 smd: 1(-2.45,1.5) 2(-2.45,1) 3(-2.45,0.5) 4(-2.45,0) 5(-2.45,-0.5) 6(-2.45,-1) 7(-2.45,-1.5) 15(2.45,-1.5) 16(2.45,-1) 17(2.45,-0.5) 18(2.45,0) 19(2.45,0.5) 20(2.45,1) 21(2.45,1.5)
  rrect25% 0.25x0.8 smd: 8(-1.5,-2.45) 9(-1,-2.45) 10(-0.5,-2.45) 11(0,-2.45) 12(0.5,-2.45) 13(1,-2.45) 14(1.5,-2.45) 22(1.5,2.45) 23(1,2.45) 24(0.5,2.45) 25(0,2.45) 26(-0.5,2.45) 27(-1,2.45) 28(-1.5,2.45)
  rect 3.7x3.7 smd: 29(0,0)
  rrect17% 1.49x1.49 on Top Paste: Un1(-0.925,0.925) Un2(-0.925,-0.925) Un3(0.925,0.925) Un4(0.925,-0.925)
F.SilkS:
  region: -2.61,2.61 -2.85,2.94 -2.37,2.94
  lines w0.254: -2.61,-1.885 -2.61,-2.61 -1.885,-2.61 ; -2.61,1.885 -2.61,2.37 ; -2.31,2.61 -1.885,2.61 ; 1.885,-2.61 2.61,-2.61 2.61,-1.885 ; 1.885,2.61 2.61,2.61 2.61,1.885
Top Component Center:
  lines w0.127: -0.127,0 0.127,0 -0.127,0 ; 0,-0.127 0,0.127 0,-0.127
Top Assembly:
  region: 2.5,-2.5 -2.5,-2.5 -2.5,1.5 -1.5,2.5 2.5,2.5
Top Courtyard:
  lines w0.254: -3.1,-1.88 -3.1,1.88 -2.75,1.88 -2.75,2.75 -1.88,2.75 -1.88,3.1 1.88,3.1 1.88,2.75 2.75,2.75 2.75,1.88 3.1,1.88 3.1,-1.88 2.75,-1.88 2.75,-2.75 1.88,-2.75 1.88,-3.1 -1.88,-3.1 -1.88,-2.75 -2.75,-2.75 -2.75,-1.88 -3.1,-1.88
Top Designator:
  text ".Designator" at -3.43,-0.344 h1.52

## VQFN-28-1EP_5x5mm_P0.5mm_EP3.7x3.7mm_ThermalVias [mm] "VQFN-28-1EP_5x5mm_P0.5mm_EP3.7x3.7mm_ThermalVias"
pads (50):
  rrect25% 0.8x0.25 smd: 1(-2.45,1.5) 2(-2.45,1) 3(-2.45,0.5) 4(-2.45,0) 5(-2.45,-0.5) 6(-2.45,-1) 7(-2.45,-1.5) 15(2.45,-1.5) 16(2.45,-1) 17(2.45,-0.5) 18(2.45,0) 19(2.45,0.5) 20(2.45,1) 21(2.45,1.5)
  rrect25% 0.25x0.8 smd: 8(-1.5,-2.45) 9(-1,-2.45) 10(-0.5,-2.45) 11(0,-2.45) 12(0.5,-2.45) 13(1,-2.45) 14(1.5,-2.45) 22(1.5,2.45) 23(1,2.45) 24(0.5,2.45) 25(0,2.45) 26(-0.5,2.45) 27(-1,2.45) 28(-1.5,2.45)
  round 0.5 hole 0.2: 29(-1.5,-1.5) 29(-1.5,-0.5) 29(-1.5,0.5) 29(-1.5,1.5) 29(-0.5,-1.5) 29(-0.5,-0.5) 29(-0.5,0.5) 29(-0.5,1.5) 29(0.5,-1.5) 29(0.5,-0.5) 29(0.5,0.5) 29(0.5,1.5) 29(1.5,-1.5) 29(1.5,-0.5) 29(1.5,0.5) 29(1.5,1.5)
  rect 3.7x3.7 smd: 29(0,0)
  rect 3.5x3.5 smd far side: 29(0,0)
  rrect17% 1.49x1.49 on Top Paste: Un1(-0.925,0.925) Un2(-0.925,-0.925) Un3(0.925,0.925) Un4(0.925,-0.925)
F.SilkS:
  region: -2.61,2.61 -2.85,2.94 -2.37,2.94
  lines w0.254: -2.61,-1.885 -2.61,-2.61 -1.885,-2.61 ; -2.61,1.885 -2.61,2.37 ; -2.31,2.61 -1.885,2.61 ; 1.885,-2.61 2.61,-2.61 2.61,-1.885 ; 1.885,2.61 2.61,2.61 2.61,1.885
Top Component Center:
  lines w0.127: -0.127,0 0.127,0 -0.127,0 ; 0,-0.127 0,0.127 0,-0.127
Top Assembly:
  region: 2.5,-2.5 -2.5,-2.5 -2.5,1.5 -1.5,2.5 2.5,2.5
Top Courtyard:
  lines w0.254: -3.1,-1.88 -2.75,-1.88 -2.75,-2.75 -1.88,-2.75 -1.88,-3.1 1.88,-3.1 1.88,-2.75 2.75,-2.75 2.75,-1.88 3.1,-1.88 3.1,1.88 2.75,1.88 2.75,2.75 1.88,2.75 1.88,3.1 -1.88,3.1 -1.88,2.75 -2.75,2.75 -2.75,1.88 -3.1,1.88 -3.1,-1.88
Top Designator:
  text ".Designator" at -3.43,-0.344 h1.52